# Altium footprint library Miscellaneous Header.PcbLib: 164 footprints (part 9 of 11)
Each footprint in its own frame and in the unit in brackets; x right, y up, seen from the top. Pads: shape width x height; smd on the part's side, far side on the other; paste and mask are expansions set on the pad; w line width, h text height; cw(c..) or ccw(c..) is an arc to the next point about the centre after c.
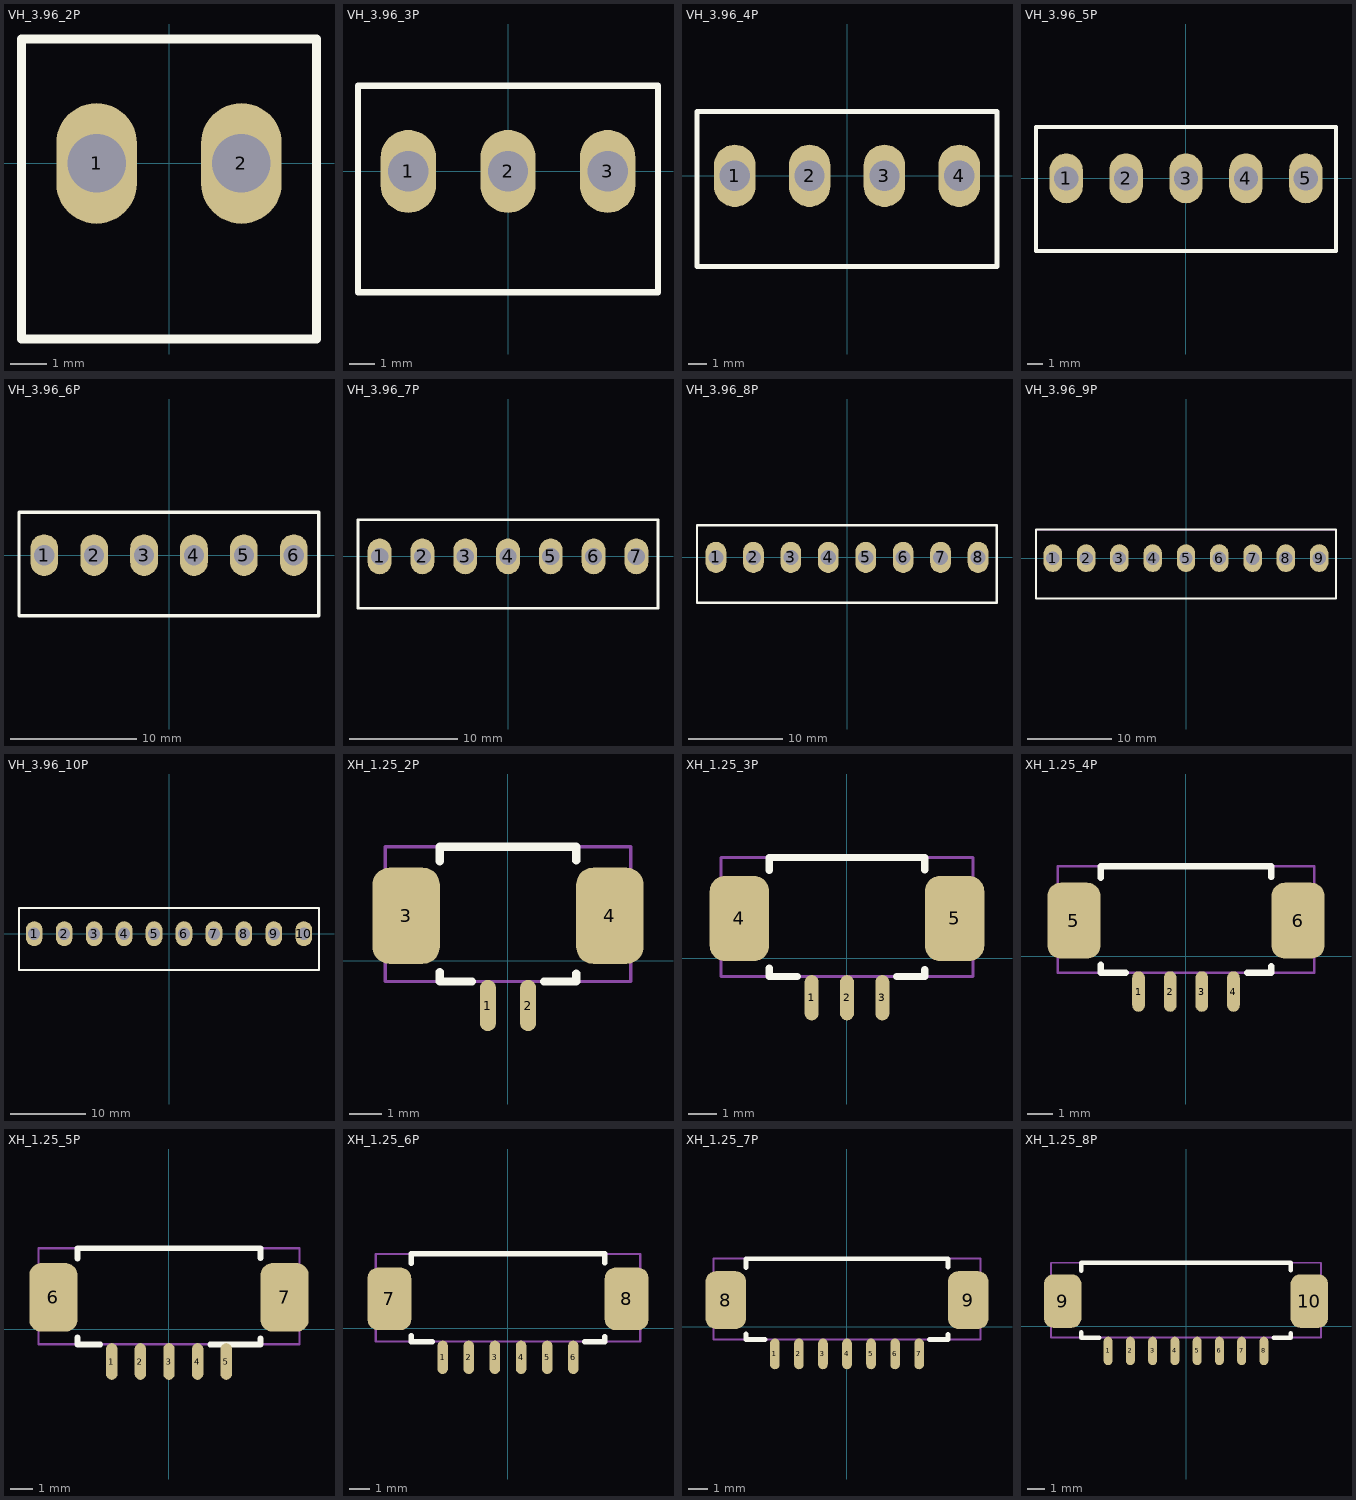
[diagram p8: the footprints below, top view; thin cyan lines are the x and y axes]

## VH_3.96_2P [mm]
pads (2):
  oval 2.2x3.3 hole 1.6: 1(-1.98,0) 2(1.98,0)
Top Overlay:
  lines w0.254: -4.03,-4.8 4.03,-4.8 4.03,3.4 -4.03,3.4 -4.03,-4.8
Mechanical 15:
  lines w0.1: -4.03,-4.8 4.03,-4.8 4.03,3.4 -4.03,3.4 -4.03,-4.8
3D body: height 10.9, standoff -3.7, extent -3.905,-4.6 3.955,3.9

## VH_3.96_3P [mm]
pads (3):
  oval 2.2x3.3 hole 1.6: 1(-3.96,0) 2(0,0) 3(3.96,0)
Top Overlay:
  lines w0.254: -5.96,-4.8 -5.96,3.4 5.96,3.4 5.96,-4.8 -5.96,-4.8
Mechanical 15:
  lines w0.1: -5.96,-4.8 -5.96,3.4 5.96,3.4 5.96,-4.8 -5.96,-4.8
3D body: height 10.9, standoff -3.7, extent -5.885,-4.6 5.935,3.9

## VH_3.96_4P [mm]
pads (4):
  oval 2.2x3.3 hole 1.6: 1(-5.94,0) 2(-1.98,0) 3(1.98,0) 4(5.94,0)
Top Overlay:
  lines w0.254: -7.94,-4.8 7.94,-4.8 7.94,3.4 -7.94,3.4 -7.94,-4.8
Mechanical 15:
  lines w0.1: -7.94,-4.8 -7.94,3.4 7.94,3.4 7.94,-4.8 -7.94,-4.8
3D body: height 10.9, standoff -3.7, extent -7.865,-4.6 7.915,3.9

## VH_3.96_5P [mm]
pads (5):
  oval 2.2x3.3 hole 1.6: 1(-7.92,0) 2(-3.96,0) 3(0,0) 4(3.96,0) 5(7.92,0)
Top Overlay:
  lines w0.254: -9.92,-4.8 9.92,-4.8 9.92,3.4 -9.92,3.4 -9.92,-4.8
Mechanical 15:
  lines w0.1: -9.92,-4.8 -9.92,3.4 9.92,3.4 9.92,-4.8 -9.92,-4.8
3D body: height 10.9, standoff -3.7, extent -9.845,-4.6 9.895,3.9

## VH_3.96_6P [mm]
pads (6):
  oval 2.2x3.3 hole 1.6: 1(-9.9,0) 2(-5.94,0) 3(-1.98,0) 4(1.98,0) 5(5.94,0) 6(9.9,0)
Top Overlay:
  lines w0.254: -11.9,-4.8 -11.9,3.4 11.88,3.4 11.88,-4.8 -11.9,-4.8
Mechanical 15:
  lines w0.1: -11.9,-4.8 11.9,-4.8 11.9,3.4 -11.9,3.4 -11.9,-4.8
3D body: height 10.9, standoff -3.7, extent -0.005,-4.6 11.815,3.9
3D body: height 10.9, standoff -3.7, extent -11.825,-4.6 -0.005,3.9

## VH_3.96_7P [mm]
pads (7):
  oval 2.2x3.3 hole 1.6: 1(-11.88,0) 2(-7.92,0) 3(-3.96,0) 4(0,0) 5(3.96,0) 6(7.92,0) 7(11.88,0)
Top Overlay:
  lines w0.254: -13.88,-4.8 -13.88,3.4 13.88,3.4 13.88,-4.8 -13.88,-4.8
Mechanical 15:
  lines w0.1: -13.88,-4.8 13.88,-4.8 13.88,3.4 -13.88,3.4 -13.88,-4.8
3D body: height 10.9, standoff -3.7, extent -13.855,-4.8 13.805,3.7

## VH_3.96_8P [mm]
pads (8):
  oval 2.2x3.3 hole 1.6: 1(-13.86,0) 2(-9.9,0) 3(-5.94,0) 4(-1.98,0) 5(1.98,0) 6(5.94,0) 7(9.9,0) 8(13.86,0)
Top Overlay:
  lines w0.254: -15.86,-4.8 -15.86,3.4 15.84,3.4 15.84,-4.8 -15.86,-4.8
Mechanical 15:
  lines w0.1: 15.84,3.4 -15.86,3.4 -15.86,-4.8 15.86,-4.8 15.86,3.4
3D body: height 10.9, standoff -3.7, extent -15.785,-4.6 15.835,3.9

## VH_3.96_9P [mm]
pads (9):
  oval 2.2x3.3 hole 1.6: 1(-15.84,0) 2(-11.88,0) 3(-7.92,0) 4(-3.96,0) 5(0,0) 6(3.96,0) 7(7.92,0) 8(11.88,0) 9(15.84,0)
Top Overlay:
  lines w0.254: -17.84,-4.8 -17.84,3.4 17.84,3.4 17.84,-4.8 -17.84,-4.8
Mechanical 15:
  lines w0.1: -17.84,-4.8 17.84,-4.8 17.84,3.4 -17.84,3.4 -17.84,-4.8
3D body: height 10.9, standoff -3.7, extent -17.765,-4.6 17.815,3.9

## VH_3.96_10P [mm]
pads (10):
  oval 2.2x3.3 hole 1.6: 1(-17.82,0) 2(-13.86,0) 3(-9.9,0) 4(-5.94,0) 5(-1.98,0) 6(1.98,0) 7(5.94,0) 8(9.9,0) 9(13.86,0) 10(17.82,0)
Top Overlay:
  lines w0.254: -19.82,-4.8 19.8,-4.8 19.8,3.4 -19.82,3.4 -19.82,-4.8
Mechanical 15:
  lines w0.1: -19.82,-4.8 -19.82,3.4 19.82,3.4 19.82,-4.8 -19.82,-4.8
3D body: height 10.9, standoff -3.7, extent -19.745,-4.6 19.795,3.9

## XH_1.25_2P [mm]
pads (4):
  oval 0.5x1.6 smd: 1(-0.625,-1.4) 2(0.625,-1.4)
  rrect50% 2.1x3 smd: 3(-3.175,1.4) 4(3.175,1.4)
Top Overlay:
  lines w0.254: -2.125,-0.35 -2.125,-0.65 -1.125,-0.65 ; -2.125,3.1 -2.125,3.55 2.125,3.55 2.125,3.125 ; 1.125,-0.65 2.125,-0.65 2.125,-0.4
Mechanical 15:
  lines w0.1: -3.825,-0.65 -3.825,3.55 3.825,3.55 3.825,-0.65 -3.825,-0.65

## XH_1.25_3P [mm]
pads (5):
  oval 0.5x1.6 smd: 1(-1.25,-1.4) 2(0,-1.4) 3(1.25,-1.4)
  rrect50% 2.1x3 smd: 4(-3.8,1.4) 5(3.8,1.4)
Top Overlay:
  lines w0.254: -2.75,-0.35 -2.75,-0.65 -1.75,-0.65 ; -2.75,3.1 -2.75,3.55 2.75,3.55 2.75,3.125 ; 1.75,-0.65 2.75,-0.65 2.75,-0.4
Mechanical 15:
  lines w0.1: -4.45,-0.65 4.45,-0.65 4.45,3.55 -4.45,3.55 -4.45,-0.65

## XH_1.25_4P [mm]
pads (6):
  oval 0.5x1.6 smd: 1(-1.875,-1.4) 2(-0.625,-1.4) 3(0.625,-1.4) 4(1.875,-1.4)
  rrect50% 2.1x3 smd: 5(-4.425,1.4) 6(4.425,1.4)
Top Overlay:
  lines w0.254: -3.375,-0.35 -3.375,-0.65 -2.375,-0.65 ; -3.375,3.1 -3.375,3.55 3.375,3.55 3.375,3.125 ; 2.425,-0.65 3.375,-0.65 3.375,-0.4
Mechanical 15:
  lines w0.1: -5.075,-0.65 -5.075,3.55 5.075,3.55 5.075,-0.65 -5.075,-0.65
3D body: height 3.5, standoff 0, extent -5.075,-1.65 5.075,3.55

## XH_1.25_5P [mm]
pads (7):
  oval 0.5x1.6 smd: 1(-2.5,-1.4) 2(-1.25,-1.4) 3(0,-1.4) 4(1.25,-1.4) 5(2.5,-1.4)
  rrect50% 2.1x3 smd: 6(-5.05,1.4) 7(5.05,1.4)
Top Overlay:
  lines w0.254: -4,-0.35 -4,-0.65 -3,-0.65 ; -4,3.1 -4,3.55 4,3.55 4,3.125 ; 1.8,-0.65 4,-0.65 4,-0.4
Mechanical 15:
  lines w0.1: -5.7,-0.65 5.7,-0.65 5.7,3.55 -5.7,3.55 -5.7,-0.65

## XH_1.25_6P [mm]
pads (8):
  oval 0.5x1.6 smd: 1(-3.125,-1.4) 2(-1.875,-1.4) 3(-0.625,-1.4) 4(0.625,-1.4) 5(1.875,-1.4) 6(3.125,-1.4)
  rrect50% 2.1x3 smd: 7(-5.675,1.4) 8(5.675,1.4)
Top Overlay:
  lines w0.254: -4.625,-0.35 -4.625,-0.65 -3.625,-0.65 ; -4.625,3.1 -4.625,3.55 4.625,3.55 4.625,3.125 ; 3.675,-0.65 4.625,-0.65 4.625,-0.4
Mechanical 15:
  lines w0.1: -6.325,-0.65 -6.325,3.55 6.325,3.55 6.325,-0.65 -6.325,-0.65
3D body: height 3.5, standoff 0, extent -6.325,-1.65 6.325,3.55

## XH_1.25_7P [mm]
pads (9):
  oval 0.5x1.6 smd: 1(-3.75,-1.4) 2(-2.5,-1.4) 3(-1.25,-1.4) 4(0,-1.4) 5(1.25,-1.4) 6(2.5,-1.4) 7(3.75,-1.4)
  rrect50% 2.1x3 smd: 8(-6.3,1.4) 9(6.3,1.4)
Top Overlay:
  lines w0.254: -5.25,-0.35 -5.25,-0.65 -4.25,-0.65 ; -5.25,3.1 -5.25,3.55 5.25,3.55 5.25,3.125 ; 4.3,-0.65 5.25,-0.65 5.25,-0.4
Mechanical 15:
  lines w0.1: -6.95,-0.65 -6.95,3.55 6.95,3.55 6.95,-0.65 -6.95,-0.65

## XH_1.25_8P [mm]
pads (10):
  oval 0.5x1.6 smd: 1(-4.375,-1.4) 2(-3.125,-1.4) 3(-1.875,-1.4) 4(-0.625,-1.4) 5(0.625,-1.4) 6(1.875,-1.4) 7(3.125,-1.4) 8(4.375,-1.4)
  rrect50% 2.1x3 smd: 9(-6.925,1.4) 10(6.925,1.4)
Top Overlay:
  lines w0.254: -5.875,-0.35 -5.875,-0.65 -4.875,-0.65 ; -5.875,3.1 -5.875,3.55 5.875,3.55 5.875,3.125 ; 4.925,-0.65 5.875,-0.65 5.875,-0.4
Mechanical 15:
  lines w0.1: -7.575,-0.65 7.575,-0.65 7.575,3.55 -7.575,3.55 -7.575,-0.65
3D body: height 3.5, standoff 0, extent -7.575,-1.65 7.575,3.55